# Altium footprint library PPTC121LFBN-RC.PcbLib: 1 footprints
Each footprint in its own frame and in the unit in brackets; x right, y up, seen from the top. Pads: shape width x height; smd on the part's side, far side on the other; paste and mask are expansions set on the pad; w line width, h text height; cw(c..) or ccw(c..) is an arc to the next point about the centre after c.
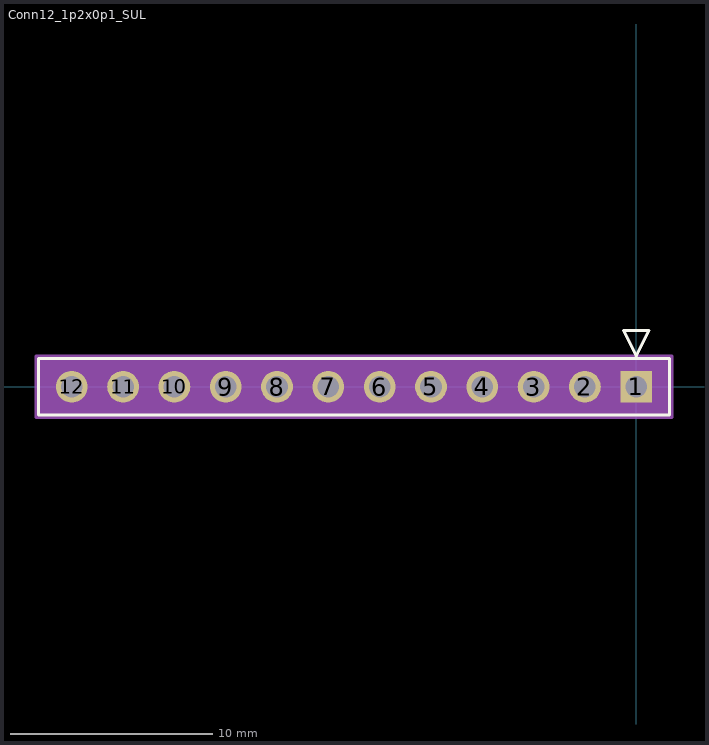
[diagram p0: the footprint, top view; thin cyan lines are the x and y axes]

## Conn12_1p2x0p1_SUL [mil]
pads (12):
  rect 62x62 hole 42 paste-31 mask+0: 1(0,0)
  round 62 hole 42 paste-31 mask+0: 2(-100,0) 3(-200,0) 4(-300,0) 5(-400,0) 6(-500,0) 7(-600,0) 8(-700,0) 9(-800,0) 10(-900,0) 11(-1000,0) 12(-1100,0)
Top Overlay:
  lines w6: -1165,-55 65,-55 65,55 -1165,55 -1165,-55 ; -25,110 0,60 25,110 -25,110
  text ".Designator" at -687.5,-25 h50
Mechanical 13:
  lines w1: -1160,-50 60,-50 60,50 -1160,50 -1160,-50 ; -25,110 0,60 25,110 -25,110
  text ".Designator" at -687.5,-25 h50
Mechanical 15:
  region: 70,60 -1170,60 -1170,-60 70,-60
  lines w6: -1170,-60 -1170,60 70,60 70,-60 -1170,-60